# Altium schematic symbol library Schematic.SchLib: 9 symbols
Pins are listed as number, name and electrical type; pins without a type are passive.

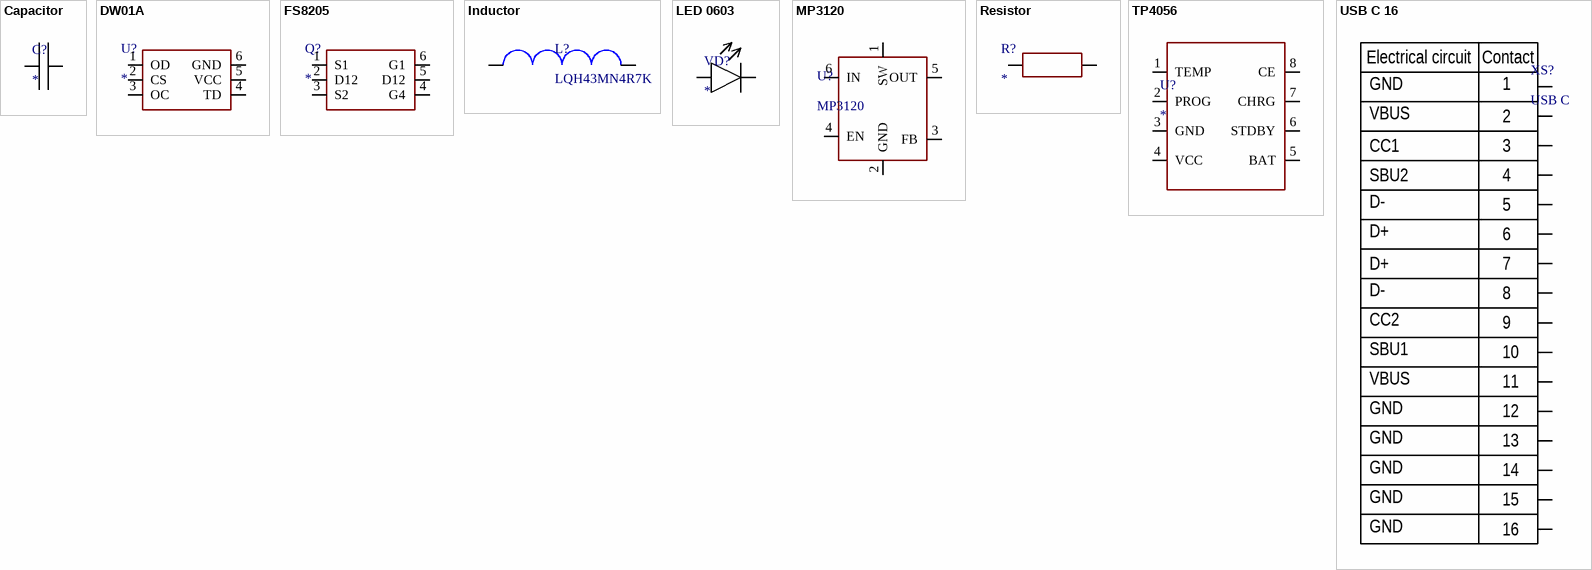
[diagram p0: symbols Capacitor to USB C 16]

## Capacitor
designator C?
Manufacturer: *; Part Number: *; Tolerance: *; Voltage Rating: *; Dielectric: *
footprint CAP_0805 (Chip Capacitor, 2-Leads, Body 2,00x1,25mm, IPC Medium Density)
footprint Cap 0603
pins: 1, 2

## DW01A
designator U?
footprint SOT23 (SOT23, 6-Leads, Body 3,00x2,85mm, Pitch 0,95mm, IPC Medium Density)
pins: 1 OD, 2 CS, 3 OC, 4 TD, 5 VCC (power), 6 GND (power)

## FS8205
designator Q?
footprint SOT23 (SOT23, 6-Leads, Body 3,00x2,85mm, Pitch 0,95mm, IPC Medium Density)
pins: 1 S1, 2 D12, 3 S2, 4 G4, 5 D12, 6 G1

## Inductor
designator L?, comment LQH43MN4R7K
footprint LQH43M
pins: 1, 2

## LED 0603
designator VD?
footprint VD0603
pins: 1 +, 2 -

## MP3120
designator U?
footprint SOT23 (SOT23, 6-Leads, Body 3,00x2,85mm, Pitch 0,95mm, IPC Medium Density)
pins: 1 SW, 2 GND, 3 FB, 4 EN, 5 OUT, 6 IN

## Resistor
designator R?
SMD 0402-0805; Manufacturer: *; Part number: *; Tolerance: *; Package: *
footprint RES_0402 (Chip Resistor, 2-Leads, Body 1,00x0,50mm, IPC Medium Density)
footprint Resistor 0603
pins: 1, 2

## TP4056
designator U?
footprint SOP8 (TSOP, 8-Leads, Body 4,90x3,90mm, Pitch 1,27mm, IPC Medium Density)
pins: 1 TEMP, 2 PROG, 3 GND, 4 VCC, 5 BAT, 6 STDBY, 7 CHRG, 8 CE

## USB C 16
designator XS?, comment USB C
footprint USB C 16
pins: 1 GND, 2 VBUS, 3 CC1, 4 SBU2, 5 D-, 6 D+, 7 D+, 8 D-, 9 CC2, 10 SBU1, 11 VBUS, 12 GND, 13 GND, 14 GND, 15 GND, 16 GND
text: Electrical circuit; Contact